# Altium schematic symbol library SCH - CONNECTORS - MOLEX 39-28-1243.SCHLIB: 1 symbol
Pins are listed as number, name and electrical type; pins without a type are passive.

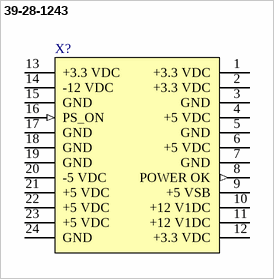
[diagram p0: symbol 39-28-1243]

## 39-28-1243
designator X?
pins: 1 +3.3 VDC (power), 2 +3.3 VDC (power), 3 GND, 4 +5 VDC (power), 5 GND, 6 +5 VDC (power), 7 GND, 8 POWER OK (out), 9 +5 VSB (power), 10 +12 V1DC (power), 11 +12 V1DC (power), 12 +3.3 VDC (power), 13 +3.3 VDC (power), 14 -12 VDC (power), 15 GND, 16 PS_ON (in), 17 GND, 18 GND, 19 GND, 20 -5 VDC (power), 21 +5 VDC (power), 22 +5 VDC (power), 23 +5 VDC (power), 24 GND